# Altium footprint library CoilcraftPCB.PcbLib: 320 footprints (part 6 of 20)
Each footprint in its own frame and in the unit in brackets; x right, y up, seen from the top. Pads: shape width x height; smd on the part's side, far side on the other; paste and mask are expansions set on the pad; w line width, h text height; cw(c..) or ccw(c..) is an arc to the next point about the centre after c.
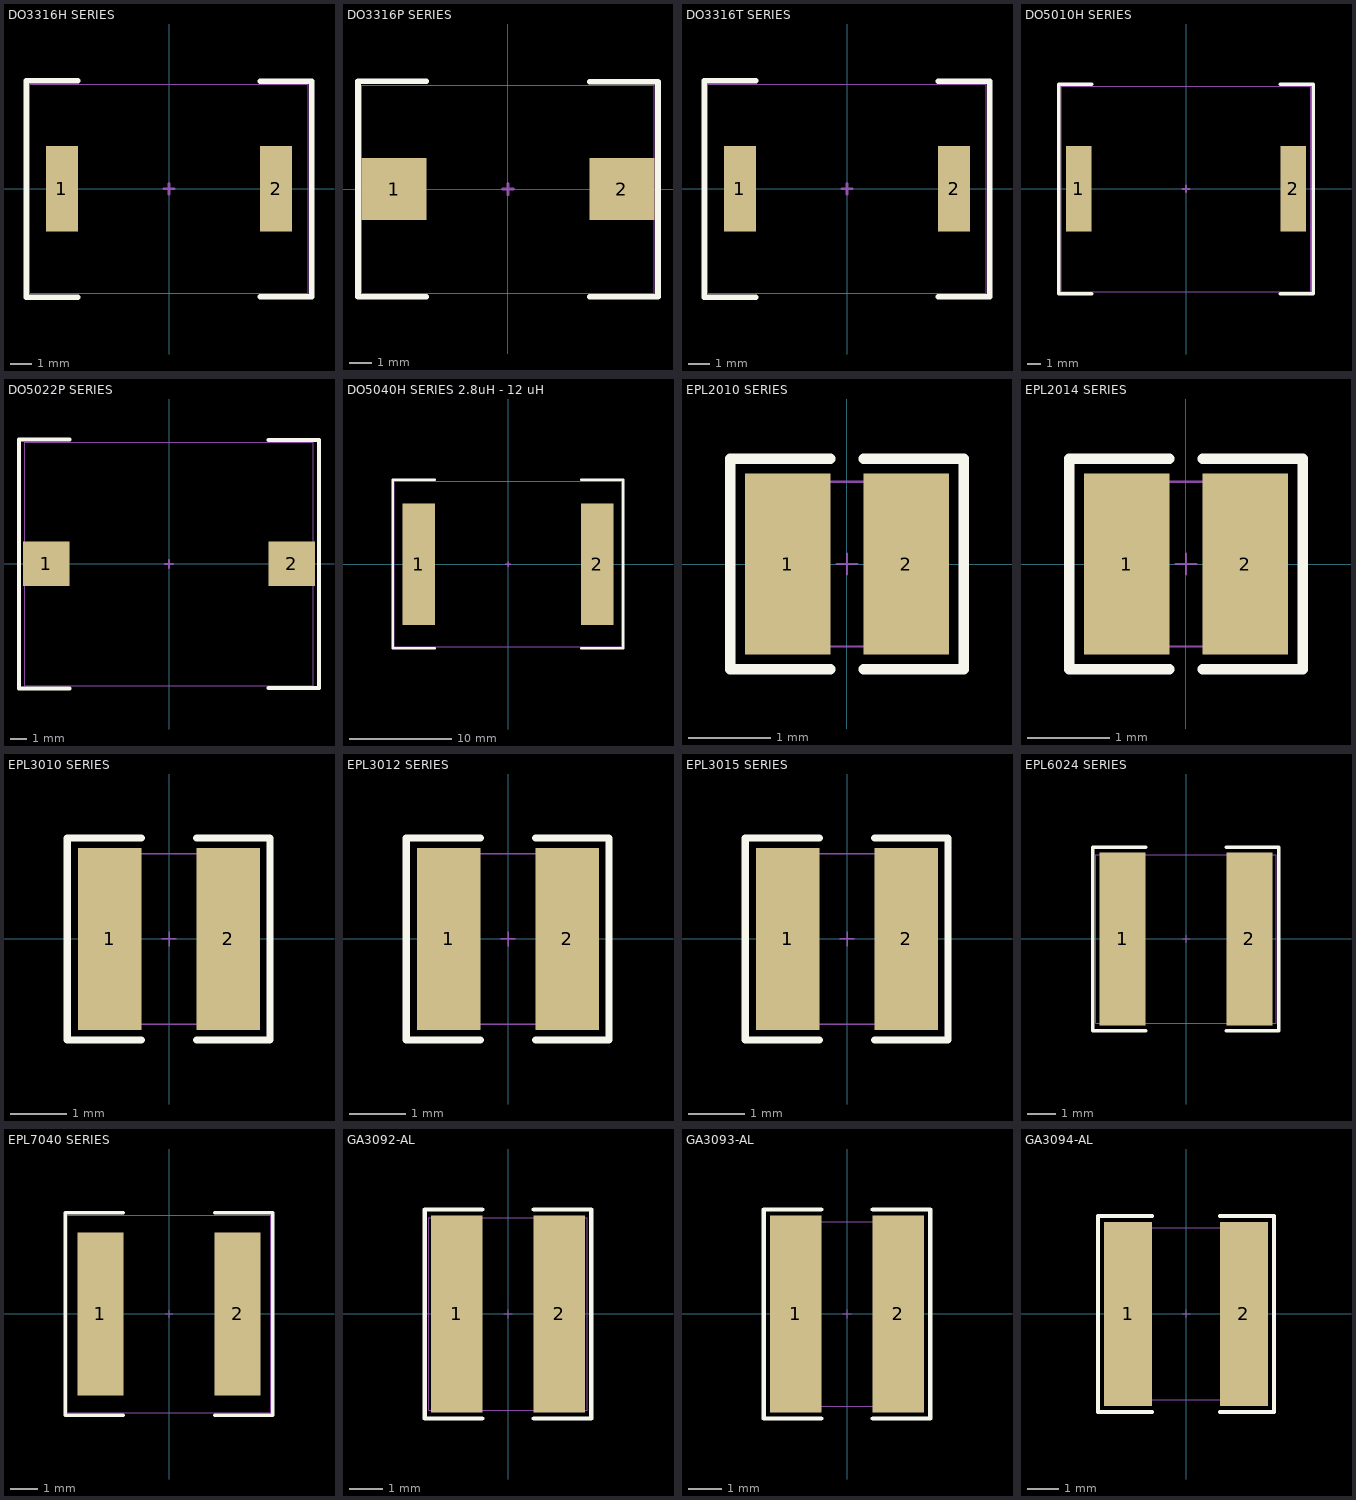
[diagram p5: the footprints below, top view; thin cyan lines are the x and y axes]

## DO3316H SERIES [mil] "Coilcraft SMT Power Inductor"
height 250
pads (2):
  rect 60x160 smd: 1(-200,0) 2(200,0)
Top Overlay:
  lines w10: -170,-202 -266.5,-202 -266.5,201.5 -170,201.5 ; 170,-201.5 266.5,-201.5 266.5,201 170,201
Mechanical 13:
  lines w5: -10,0 10,0 ; 0,-10 0,10
Mechanical 14:
  lines w1: -260,-195 260,-195 260,195 -260,195 -260,-195
3D body: height 249.07, standoff 1, extent -260.04,-195.08 260.04,195.08

## DO3316P SERIES [mil] "Coilcraft SMT Power Inductor"
height 205
pads (2):
  rect 115x110 smd: 1(-202.5,0) 2(202.5,0)
Top Overlay:
  lines w10: -145,-191 -266.5,-191 -266.5,191.5 -145,191.5 ; 145,-191 266.5,-191 266.5,191 145,191
Mechanical 13:
  lines w5: -10,0 10,0 ; 0,-10 0,10
Mechanical 14:
  lines w1: -260,-185 260,-185 260,185 -260,185 -260,-185
3D body: height 205.15, standoff 0.03, extent -243.57,-185.04 243.56,185.04

## DO3316T SERIES [mil] "Coilcraft SMT Power Inductor"
height 250
pads (2):
  rect 60x160 smd: 1(-200,0) 2(200,0)
Top Overlay:
  lines w10: -170,-202 -266.5,-202 -266.5,201.5 -170,201.5 ; 170,-201.5 266.5,-201.5 266.5,201 170,201
Mechanical 13:
  lines w5: -10,0 10,0 ; 0,-10 0,10
Mechanical 14:
  lines w1: -260,-195 260,-195 260,195 -260,195 -260,-195
3D body: height 249.07, standoff 1, extent -260.04,-195.08 260.04,195.08

## DO5010H SERIES [mil] "Coilcraft SMT Power Inductor"
height 315
pads (2):
  rect 75x250 smd: 1(-313,0) 2(313,0)
Top Overlay:
  lines w10: -275.5,-306.5 -371,-306.5 -371,306 -275.5,306 ; 275.5,-306 371,-306 371,305.5 275.49,305.5
Mechanical 13:
  lines w5: -10,0 10,0 ; 0,-10 0,10
Mechanical 14:
  lines w1: -365,-300 365,-300 365,300 -365,300 -365,-300
3D body: height 316.17, standoff 1.21, extent -361.42,-300 361.41,300

## DO5022P SERIES [mil] "Coilcraft SMT Power Inductor"
height 280
pads (2):
  rect 115x110 smd: 1(-302.5,0) 2(302.5,0)
Top Overlay:
  lines w10: -245,-306.5 -369.5,-306.5 -369.5,306 -245,306 ; 245,-306 369.5,-306 369.5,305.5 244.99,305.5
Mechanical 13:
  lines w5: -10,0 10,0 ; 0,-10 0,10
Mechanical 14:
  lines w1: -355,-300 -355,300 355,300 355,-300 -355,-300
3D body: height 279.79, standoff 0.06, extent -355,-290 355,290

## DO5040H SERIES 2.8uH - 12 uH [mil] "Coilcraft SMT Power Inductor"
height 472
pads (2):
  rect 125x470 smd: 1(-345,0) 2(345,0)
Top Overlay:
  lines w10: -282.5,-326 -446,-326 -446,327 -282.5,327 ; 282.51,-325.5 446,-325.5 446,326.5 282.5,326.5
Mechanical 13:
  lines w5: -10,0 10,0 ; 0,-10 0,10
Mechanical 14:
  lines w1: -440,-320 440,-320 440,320 -440,320 -440,-320
3D body: height 472.61, standoff 0.37, extent -433.47,-314.96 433.46,314.96

## EPL2010 SERIES [mil] "Coilcraft Shielded Power Inductor"
height 41
pads (2):
  rect 41x87 smd: 1(-28.5,0) 2(28.5,0)
Top Overlay:
  lines w5: -8,-50.5 -56,-50.5 -56,50.5 -8,50.5 ; 8,-50.5 56,-50.5 56,50.5 8,50.5
Mechanical 13:
  lines w1: -5,0 5,0 ; 0,-5 0,5
Mechanical 14:
  lines w1: -39.5,-39.5 -39.5,39.5 39.5,39.5 39.5,-39.5 -39.5,-39.5
3D body: height 41.34, standoff 0, extent -43.3,-43.3 43.31,43.31

## EPL2014 SERIES [mil] "Coilcraft Shielded Power Inductor"
height 57
pads (2):
  rect 41x87 smd: 1(-28.5,0) 2(28.5,0)
Top Overlay:
  lines w5: -8,-50.5 -56,-50.5 -56,50.5 -8,50.5 ; 8,-50.5 56,-50.5 56,50.5 8,50.5
Mechanical 13:
  lines w1: -5,0 5,0 ; 0,-5 0,5
Mechanical 14:
  lines w1: -39.5,-39.5 39.5,-39.5 39.5,39.5 -39.5,39.5 -39.5,-39.5
3D body: height 57.09, standoff 0, extent -43.3,-43.3 43.31,43.31

## EPL3010 SERIES [mil] "Coilcraft Shielded Power Inductor"
height 43
pads (2):
  rect 44x126 smd: 1(-41,0) 2(41,0)
Top Overlay:
  lines w5: -19,-70 -70.5,-70 -70.5,70 -19,70 ; 19,-70 70,-70 70,70 19,70
Mechanical 13:
  lines w1: -5,0 5,0 ; 0,-5 0,5
Mechanical 14:
  lines w1: -59,-59 -59,59 59,59 59,-59 -59,-59
3D body: height 43.31, standoff 0, extent -62.99,-62.99 63,63

## EPL3012 SERIES [mil] "Coilcraft Shielded Power Inductor"
height 51
pads (2):
  rect 44x126 smd: 1(-41,0) 2(41,0)
Top Overlay:
  lines w5: -19,-70 -70.5,-70 -70.5,70 -19,70 ; 19,-70 70,-70 70,70 19,70
Mechanical 13:
  lines w1: -5,0 5,0 ; 0,-5 0,5
Mechanical 14:
  lines w1: -59,-59 -59,59 59,59 59,-59 -59,-59
3D body: height 51.18, standoff 0, extent -62.99,-62.99 63,63

## EPL3015 SERIES [mil] "Coilcraft Shielded Power Inductor"
height 61
pads (2):
  rect 44x126 smd: 1(-41,0) 2(41,0)
Top Overlay:
  lines w5: -19,-70 -70.5,-70 -70.5,70 -19,70 ; 19,-70 70,-70 70,70 19,70
Mechanical 13:
  lines w1: -5,0 5,0 ; 0,-5 0,5
Mechanical 14:
  lines w1: -59,-59 59,-59 59,59 -59,59 -59,-59
3D body: height 61.02, standoff 0, extent -62.99,-62.99 63,63

## EPL6024 SERIES [mil] "Coilcraft Shielded Power Inductor"
height 94
pads (2):
  rect 65x244 smd: 1(-89.5,0) 2(89.5,0)
Top Overlay:
  lines w5: -57,-129.5 -131.5,-129.5 -131.5,129.5 -57,129.5 ; 57,-129.5 131,-129.5 131,129.5 57,129.5
Mechanical 13:
  lines w1: -5,0 5,0 ; 0,-5 0,5
Mechanical 14:
  lines w1: -127,-119 127,-119 127,119 -127,119 -127,-119
3D body: height 94.55, standoff 0.06, extent -129.92,-122.04 129.92,122.05

## EPL7040 SERIES [mil] "Coilcraft Shielded Power Inductor"
height 161
pads (2):
  rect 65x232 smd: 1(-97.5,0) 2(97.5,0)
Top Overlay:
  lines w5: -65,-144 -148,-144 -148,144 -65,144 ; 65,-144 148,-144 148,144 65,144
Mechanical 13:
  lines w1: -5,0 5,0 ; 0,-5 0,5
Mechanical 14:
  lines w1: -144.5,-140.5 -144.5,140.5 144.5,140.5 144.5,-140.5 -144.5,-140.5
3D body: height 161.48, standoff 0.06, extent -147.64,-143.7 147.64,143.7

## GA3092-AL [mil] "Coilcraft High Current Air Core Inductors"
height 210
pads (2):
  rect 60x230 smd: 1(-60,0) 2(60,0)
Top Overlay:
  lines w5: -30,-122 -97,-122 -97,122 -30,122 ; 30,-122 97,-122 97,122 30,122
Mechanical 13:
  lines w1: -5,0 5,0 ; 0,-5 0,5
Mechanical 14:
  lines w1: -92.5,-112.5 92.5,-112.5 92.5,112.5 -92.5,112.5 -92.5,-112.5
3D body: height 180, standoff 0, extent -77.44,-105 77.44,105

## GA3093-AL [mil] "Coilcraft High Current Air Core Inductors"
height 195
pads (2):
  rect 60x230 smd: 1(-60,0) 2(60,0)
Top Overlay:
  lines w5: -30,-122 -97,-122 -97,122 -30,122 ; 30,-122 97,-122 97,122 30,122
Mechanical 13:
  lines w1: -5,0 5,0 ; 0,-5 0,5
Mechanical 14:
  lines w1: -87.5,-107.5 -87.5,107.5 87.5,107.5 87.5,-107.5 -87.5,-107.5
3D body: height 180, standoff 0, extent -84,-104.5 84,105.5

## GA3094-AL [mil] "Coilcraft High Current Air Core Inductors"
height 195
pads (2):
  rect 60x230 smd: 1(-72.5,0) 2(72.5,0)
Top Overlay:
  lines w5: -42.5,-122.5 -110,-122.5 -110,122.5 -42.5,122.5 ; 42.5,-122.5 110,-122.5 110,122.5 42.5,122.5
Mechanical 13:
  lines w1: -5,0 5,0 ; 0,-5 0,5
Mechanical 14:
  lines w1: -97.5,-107.5 -97.5,107.5 97.5,107.5 97.5,-107.5 -97.5,-107.5
3D body: height 180, standoff 0, extent -91.5,-105 91.5,105